# Altium integrated library DFE252010P-4R7M.IntLib: 1 symbol
Pins are listed as number, name and electrical type; pins without a type are passive.

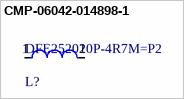
[diagram p0: symbol CMP-06042-014898-1]

## CMP-06042-014898-1
designator L?, comment DFE252010P-4R7M=P2
Shielded Wirewound Inductor 4.7uH  1100mA 0.27Ω 1008 (2520); Core Material: Ferrite; Test Frequency: 1MHz; Current Rating: 1.7A; Max DC Current: 1.1A; DC Resistance (DCR): 270mR; Tolerance: 20%; Max Operating Temperature: 125°C; Length: 0.098inch; Inductance: 4.7uH; Height - Seated (Max): 0.039inch; Min Operating Temperature: -40°C; Case Code (Imperial): 1008; Mount: Surface Mount; Resistor Type: Wirewound; Shielding: Shielded; Case Code (Metric): 2520; Case/Package: 1008; Width: 0.079inch; Depth: 2mm; Packaging: Tape and Reel
footprint FP-DFE252010C-MFG
footprint FP-DFE252010C-IPC_B
footprint FP-DFE252010C-IPC_A
footprint FP-DFE252010C-IPC_C
pins: 1, 2